# Altium integrated library Components - 02.07.26 - 15.13.IntLib: 1 symbol
Pins are listed as number, name and electrical type; pins without a type are passive.

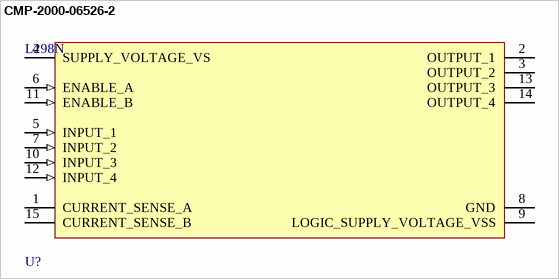
[diagram p0: symbol CMP-2000-06526-2]

## CMP-2000-06526-2
designator U?, comment L298N
Motor Driver, DC Brush, Full Bridge, 4 Outputs, 4.8V to 46V Supply, 2A Out, Multiwatt-15; Manufacturer: STMicroelectronics; Category 9E07530Daf1645C0: Semiconductors and Actives; Motor Type: Stepper; Category 20B3Edb914A9Fb74: Uncategorized; Max Junction Temp: +150°C; Symbol Hash: 018030ebe01bceb9a97b0e1e13c481ee1fe16978b02513f12e6a03482c2c62a5; Max Supply Voltage: 7V; Verification Version: 0.0.0.3; Category 2Fc5E2Cf1B85F402: Interface ICs; Category 1742Da482592Cc85: H-Bridges; Min Supply Voltage: 4.5V; Category 56439B4967F48D84: Power Management; Category D2Bc1Fb6E06F097B: Solid State Switches; Symbol 0 0: Standard; Number Of Outputs: 4; Motor Type: Brushed; Drain to Source Resistance: 930mΩ; Max Collector Current: 3A; Interface: Parallel; Number of Channels: 2; Quiescent Current: 500mA; Operating Supply Current: 13mA; Max Output Current: 4A; Operating Supply Voltage: 5V; Mouser Description: Motor Driver, DC Brush, Full Bridge, 4 Outputs, 4.8V to 46V Supply, 2A Out, Multiwatt-15; Datasheet Version: 5; Category 84F649Fcb0Ed5F31: Uncategorized; Octopart Part Number: 8e8a47878f08514d; Temperature Range High: +150°C; Part Number: L298N; Digikey Description: IC BRIDGE DRIVER PAR 15MULTIWATT; Digikey Part Number: 497-1395-5-ND; Temperature Range Low: -40°C; ComponentLink2URL: https://www.st.com/content/ccc/resource/technical/document/datasheet/82/cc/3f/39/0a/29/4d/f0/CD00000240.pdf/files/CD00000240.pdf/jcr:content/translations/en.CD00000240.pdf; ComponentLink2Description: Datasheet; Mouser Part Number: 511-L298; Height: 21mm; Automotive: No; Lead Free: Yes; Datasheet Date: 2023-10-06; RoHS: TRUE; Output Current: 2A; Mounting Type: Through Hole; Output Voltage: 46V; Package: 0; ComponentLink1Description: Upverter; Supplier 2: Mouser; Supplier 1: Digi-Key; ComponentLink1URL: https://upverter.com/part/id/f62b3fc7d494ca66/; Supplier Part Number 2: 511-L298; Supplier Part Number 1: 497-1395-5-ND; helpURL: https://upverter.com/part/id/f62b3fc7d494ca66/; Temperature: -40°C to +150°C; Length: 19.6mm; Lead Free: Lead Free; Collector Emitter Voltage (VCEO): 46V; China RoHS: Non-Compliant; Height: 10.7mm; RoHS: Compliant; Number of Pins: 13; Output Current per Channel: 2A; Max Operating Temperature: 150°C; Terminal Pitch: 1.27mm; Height - Seated (Max): 21mm; Number of Outputs: 4; Min Supply Voltage (DC): 4.8V; ComponentLink1Description: Manufacturer's Website; Number of Terminals: 15; Number of Circuits: 2; Min Operating Temperature: -40°C; Mount: Through Hole; Width: 5mm; REACH SVHC: No; Lifecycle Status: Production; HelpURL: https://www.st.com/content/ccc/resource/technical/document/datasheet/82/cc/3f/39/0a/29/4d/f0/CD00000240.pdf/files/CD00000240.pdf/jcr:content/translations/en.CD00000240.pdf; ComponentLink1URL: http://www.st.com; Schedule B: 8542390000, 8542390000|8542390000|8542390000|8542390000|8542390000; Number of Drivers: 2; Radiation Hardening: No; Number of Transmitters: 2; ComponentLink2Description: Datasheet URL
footprint L298N_MFG
footprint L298N_MFG (Recommended Land Pattern)
pins: 1 CURRENT_SENSE_A, 2 OUTPUT_1, 3 OUTPUT_2, 4 SUPPLY_VOLTAGE_VS (power), 5 INPUT_1 (in), 6 ENABLE_A (in), 7 INPUT_2 (in), 8 GND (power), 9 LOGIC_SUPPLY_VOLTAGE_VSS (power), 10 INPUT_3 (in), 11 ENABLE_B (in), 12 INPUT_4 (in), 13 OUTPUT_3, 14 OUTPUT_4, 15 CURRENT_SENSE_B